# Altium schematic symbol library SI4464-B1B-FMR.SchLib: 1 symbol
Pins are listed as number, name and electrical type; pins without a type are passive.

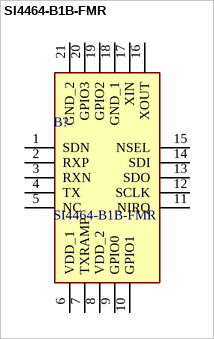
[diagram p0: symbol SI4464-B1B-FMR]

## SI4464-B1B-FMR
designator B?
RF Transceiver +20 dBm sub-GHz transmitter; Manufacturer_Name: Silicon Labs; Geometry.Height: 0.9mm; Mouser Part Number: 634-SI4464-B1X-FMR; Mouser Price/Stock: https://www.mouser.co.uk/ProductDetail/Silicon-Labs/SI4464-B1B-FMR?qs=v11sNlF%252BHAdMGha0TrMSMw%3D%3D; Manufacturer_Part_Number: SI4464-B1B-FMR; Datasheet Link: https://www.silabs.com/documents/public/data-sheets/Si4464-63-61-60.pdf
footprint QFN50P400X400X90-21N-D
pins: 1 SDN, 2 RXP, 3 RXN, 4 TX, 5 NC, 6 VDD_1, 7 TXRAMP, 8 VDD_2, 9 GPIO0, 10 GPIO1, 11 NIRQ, 12 SCLK, 13 SDO, 14 SDI, 15 NSEL, 16 XOUT, 17 XIN, 18 GND_1, 19 GPIO2, 20 GPIO3, 21 GND_2